# Altium footprint library Footprint-Lib-PhilsLab.PcbLib: 544 footprints (part 12 of 34)
Each footprint in its own frame and in the unit in brackets; x right, y up, seen from the top. Pads: shape width x height; smd on the part's side, far side on the other; paste and mask are expansions set on the pad; w line width, h text height; cw(c..) or ccw(c..) is an arc to the next point about the centre after c.
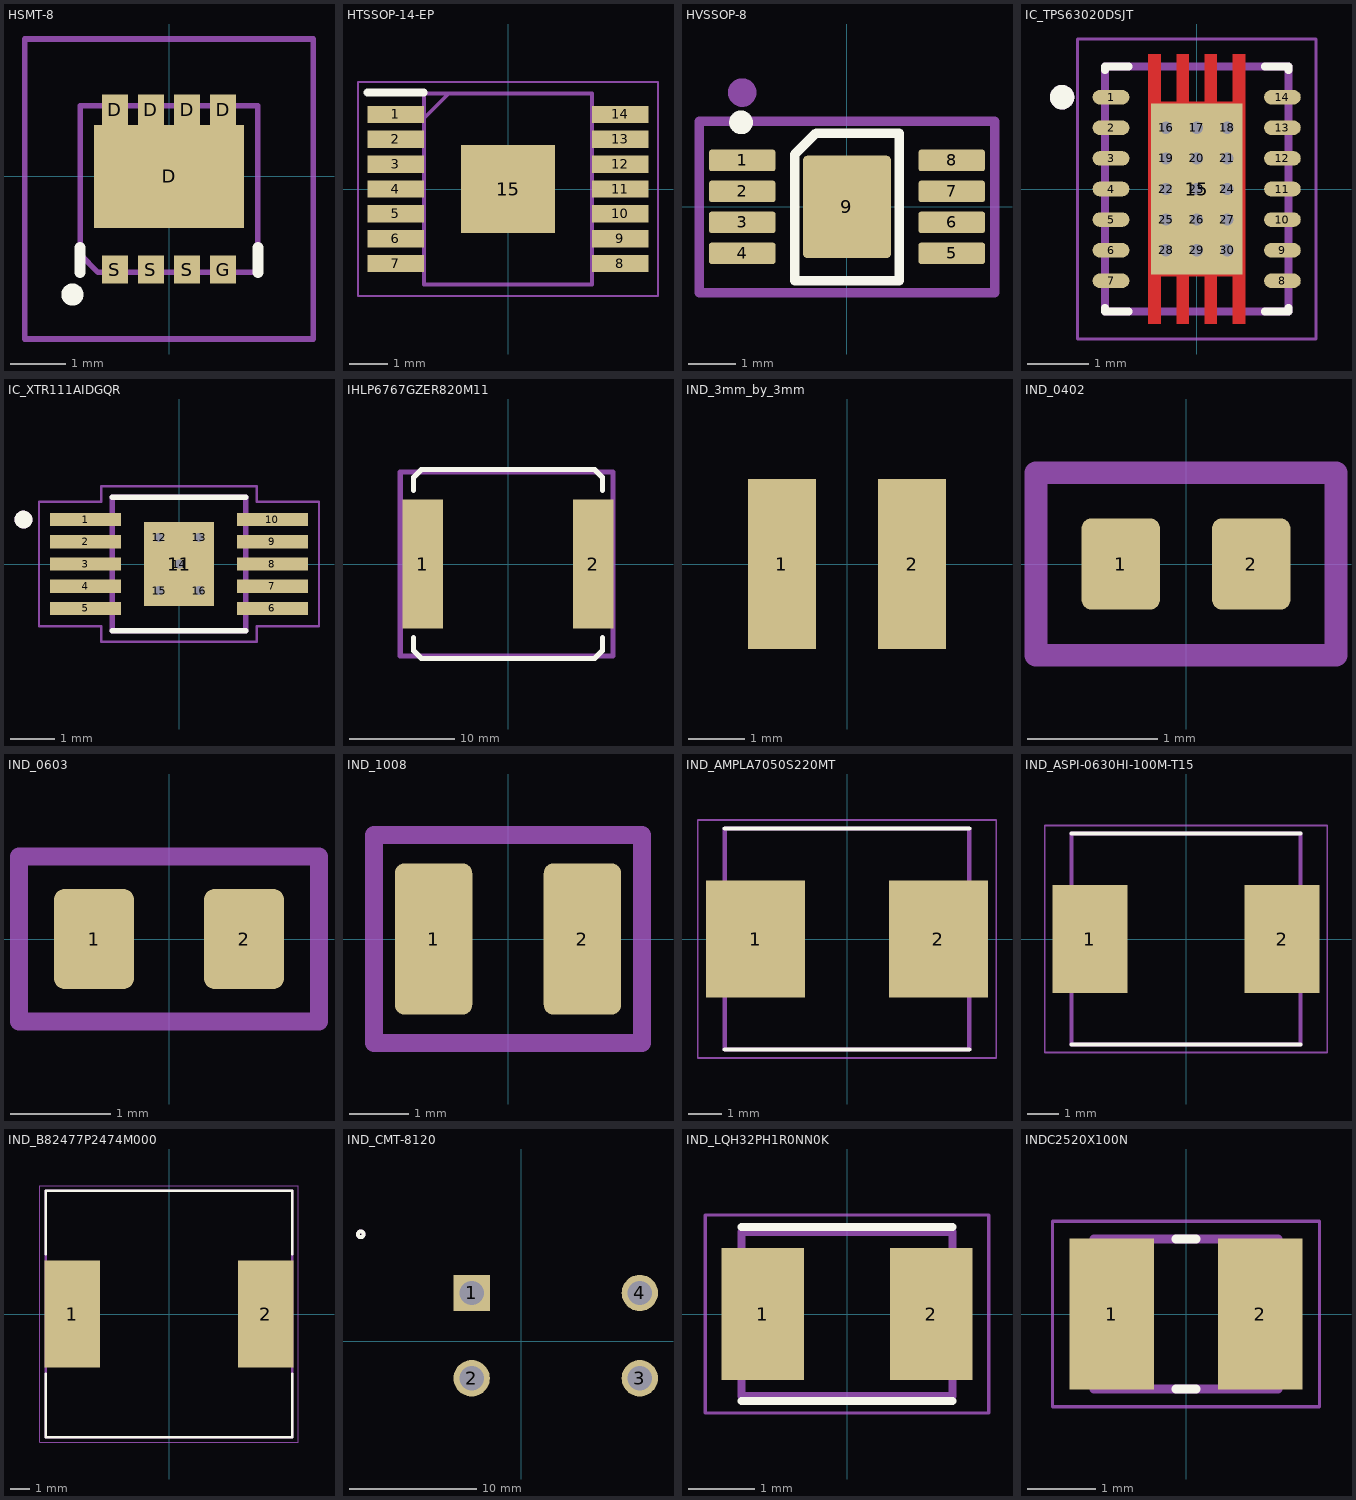
[diagram p11: the footprints below, top view; thin cyan lines are the x and y axes]

## HSMT-8 [mm]
pads (9):
  rect 0.47x0.55 smd: D(-0.975,1.2) D(-0.325,1.2) D(0.325,1.2) D(0.975,1.2)
  rect 2.7x1.85 smd: D(0,0)
  rect 0.47x0.5 smd: G(0.975,-1.675) S(-0.975,-1.675) S(-0.325,-1.675) S(0.325,-1.675)
Top Overlay:
  lines w0.2: -1.6,-1.725 -1.6,-1.275 ; 1.6,-1.725 1.6,-1.275 ; -1.839,-2.125 ccw(c-1.739,-2.125) -1.639,-2.125 ccw(c-1.739,-2.125) -1.839,-2.125
Mechanical 13:
  lines w0.1: -1.6,-1.4 -1.6,1.275 1.6,1.275 1.6,-1.725 -1.275,-1.725 -1.6,-1.4
  text "'.Designator'" at -6.315,-1.4 h1
Mechanical 15:
  lines w0.1: -2.6,-2.925 2.6,-2.925 2.6,2.475 -2.6,2.475 -2.6,-2.925
3D body "RQ3E150GNTB.stp": height 1, standoff 0, extent -1.6,-1.878 1.6,1.428

## HTSSOP-14-EP [mm]
pads (15):
  rect 1.475x0.45 smd: 1(-2.938,1.95) 2(-2.938,1.3) 3(-2.938,0.65) 4(-2.938,0) 5(-2.938,-0.65) 6(-2.938,-1.3) 7(-2.938,-1.95) 8(2.938,-1.95) 9(2.938,-1.3) 10(2.938,-0.65) 11(2.938,0) 12(2.938,0.65) 13(2.938,1.3) 14(2.938,1.95)
  rect 2.46x2.31 smd: 15(0,0)
Top Overlay:
  lines w0.2: -3.675,2.525 -2.2,2.525
Mechanical 13:
  lines w0.1: -2.2,1.85 -1.55,2.5 ; -2.2,-2.5 -2.2,2.5 2.2,2.5 2.2,-2.5 -2.2,-2.5
  text "'.Designator'" at -5.84,-0.925 h1
Mechanical 15:
  lines w0.05: -3.925,-2.8 -3.925,2.8 3.925,2.8 3.925,-2.8 -3.925,-2.8
3D body "TPS54386TPWPRQ1.stp": height 1.13, standoff 0, extent -3.2,-2.5 3.2,2.5

## HVSSOP-8 [mm]
height 1.1
pads (9):
  rrect25% 1.4x0.45 smd: 1(-2.2,0.975) 2(-2.2,0.325) 3(-2.2,-0.325) 4(-2.2,-0.975) 5(2.2,-0.975) 6(2.2,-0.325) 7(2.2,0.325) 8(2.2,0.975)
  rrect10% 1.85x2.15 smd: 9(0,0)
Top Overlay:
  circle w0.25: c-2.225,1.775 r0.125
  lines w0.2: -1.1,-1.55 -1.1,1.1 -0.65,1.55 1.1,1.55 1.1,-1.55 -1.1,-1.55
Mechanical 13:
  circle w0.3: c-2.2,2.4 r0.15
  lines w0.2: -3.1,-1.8 3.1,-1.8 3.1,1.8 -3.1,1.8 -3.1,-1.8
  text "'.Designator'" at -5.815,-0.9 h1
Mechanical 15:
  lines w0.05: -3.15,-1.8 3.15,-1.8 3.15,1.8 -3.15,1.8 -3.15,-1.8
  lines w0.1: -0.5,0 0.5,0 ; 0,-0.5 0,0.5
3D body "HVSSOP-8.step": height 1.1, standoff 0, extent -2.45,-1.55 2.45,1.55

## IC_TPS63020DSJT [mm]
height 1
pads (30):
  oval 0.6x0.24 smd mask+0: 1(-1.4,1.5) 2(-1.4,1) 3(-1.4,0.5) 4(-1.4,0) 5(-1.4,-0.5) 6(-1.4,-1) 7(-1.4,-1.5) 8(1.4,-1.5) 9(1.4,-1) 10(1.4,-0.5) 11(1.4,0) 12(1.4,0.5) 13(1.4,1) 14(1.4,1.5)
  rect 1.5x2.8 smd paste-2 mask+0: 15(0,0)
  round 0.3 hole 0.2: 16(-0.5,1) 17(0,1) 18(0.5,1) 19(-0.5,0.5) 20(0,0.5) 21(0.5,0.5) 22(-0.5,0) 23(0,0) 24(0.5,0) 25(-0.5,-0.5) 26(0,-0.5) 27(0.5,-0.5) 28(-0.5,-1) 29(0,-1) 30(0.5,-1)
Top Layer:
  region: 0.79,-2.2 0.59,-2.2 0.59,-1.425 0.33,-1.425 0.33,-2.2 0.13,-2.2 0.13,-1.425 -0.13,-1.425 -0.13,-2.2 -0.33,-2.2 -0.33,-1.425 -0.59,-1.425 -0.59,-2.2 -0.79,-2.2 -0.79,2.2 -0.59,2.2 -0.59,1.425 -0.33,1.425 -0.33,2.2 -0.13,2.2 -0.13,1.425 0.13,1.425 0.13,2.2 0.33,2.2 0.33,1.425 0.59,1.425 0.59,2.2 0.79,2.2
Top Overlay:
  circle w0.2: c-2.2,1.5 r0.1
  lines w0.127: -1.5,-1.94 -1.5,-2 -1.11,-2 ; -1.5,1.94 -1.5,2 -1.11,2 ; 1.11,-2 1.5,-2 1.5,-1.94 ; 1.11,2 1.5,2 1.5,1.94
Top Paste:
  region: -0.13,-2.2 -0.33,-2.2 -0.33,-1.35 -0.59,-1.35 -0.59,-2.2 -0.79,-2.2 -0.79,-0.1 -0.13,-0.1
  region: 0.79,-2.2 0.59,-2.2 0.59,-1.35 0.33,-1.35 0.33,-2.2 0.13,-2.2 0.13,-0.1 0.79,-0.1
  region: 0.79,0.1 0.13,0.1 0.13,2.2 0.33,2.2 0.33,1.35 0.59,1.35 0.59,2.2 0.79,2.2
  region: -0.13,0.1 -0.79,0.1 -0.79,2.2 -0.59,2.2 -0.59,1.35 -0.33,1.35 -0.33,2.2 -0.13,2.2
Top Solder:
  drawing of 15 lines, arcs and shapes, not listed
Mechanical 13:
  circle w0.2: c-2.2,1.5 r0.1
  lines w0.127: -1.5,-2 -1.5,2 1.5,2 1.5,-2 -1.5,-2
Mechanical 15:
  lines w0.05: -1.95,-2.45 -1.95,2.45 1.95,2.45 1.95,-2.45 -1.95,-2.45
3D body "step_temp.STEP": height 1, standoff 0, extent -1.5,-2 1.5,2

## IC_XTR111AIDGQR [mm]
pads (16):
  rect 1.6x0.3 smd paste-0.025 mask+0.05: 1(-2.1,1) 2(-2.1,0.5) 3(-2.1,0) 4(-2.1,-0.5) 5(-2.1,-1) 6(2.1,-1) 7(2.1,-0.5) 8(2.1,0) 9(2.1,0.5) 10(2.1,1)
  rect 1.57x1.88 smd: 11(0,0)
  round 0.4 hole 0.2 mask+0: 12(-0.45,0.6) 13(0.45,0.6) 14(0,0) 15(-0.45,-0.6) 16(0.45,-0.6)
Top Overlay:
  circle w0.2: c-3.5,1 r0.1
  lines w0.127: -1.5,-1.5 1.5,-1.5 ; -1.5,1.5 1.5,1.5
Mechanical 13:
  circle w0.2: c-3.5,1 r0.1
  lines w0.127: -1.5,-1.5 1.5,-1.5 1.5,1.5 -1.5,1.5 -1.5,-1.5
Mechanical 15:
  lines w0.05: -3.15,-1.4 -1.75,-1.4 -1.75,-1.75 1.75,-1.75 1.75,-1.4 3.15,-1.4 3.15,1.4 1.75,1.4 1.75,1.75 -1.75,1.75 -1.75,1.4 -3.15,1.4 -3.15,-1.4
3D body "step_temp.STEP": height 1.1, standoff 0, extent -2.45,-1.5 2.45,1.5

## IHLP6767GZER820M11 [mm]
pads (2):
  rect 3.825x12.32 smd: 1(-8.12,0) 2(8.12,0)
Top Overlay:
  lines w0.5: -9,-7 -9,-8.25 -8.25,-9 8.25,-9 9,-8.25 9,-7 ; -9,7 -9,8.25 -8.25,9 8.25,9 9,8.25 9,7
Mechanical 13:
  lines w0.5: -10.25,-8.75 -10.25,8.75 10,8.75 10,-8.75 -10.25,-8.75
  text "'.Designator'" at -5.665,-0.417 h1
3D body "IHLP-6767GZ-11.STEP": height 7.01, standoff 0.01, extent -8.575,-8.575 8.575,8.575

## IND_3mm_by_3mm [mm] "Inductor package type: 3mm by 3mm"
pads (2):
  rect 1.2x3 smd: 1(-1.15,0) 2(1.15,0)
3D body "vls3012cx-1.step": height 1.21, standoff 0.01, extent -1.502,-1.509 1.502,1.509

## IND_0402 [mm]
pads (2):
  rrect25% 0.6x0.7 smd: 1(-0.5,0) 2(0.5,0)
Mechanical 13:
  lines w0.175: -1.15,-0.7 1.15,-0.7 1.15,0.7 -1.15,0.7 -1.15,-0.7
  text "'.Designator'" at -5.665,-0.417 h1
3D body "L0402.step": height 0.67, standoff 0.01, extent -0.56,-0.256 0.56,0.256

## IND_0603 [mm]
pads (2):
  rrect25% 0.8x1 smd: 1(-0.75,0) 2(0.75,0)
Mechanical 13:
  lines w0.175: -1.5,-0.825 -1.5,0.825 1.5,0.825 1.5,-0.825 -1.5,-0.825
  text "'.Designator'" at -5.665,-0.417 h1
3D body "L0603.step": height 0.87, standoff 0.01, extent -0.81,-0.365 0.81,0.365

## IND_1008 [mm]
pads (2):
  rrect25% 1.3x2.54 smd: 1(-1.25,0) 2(1.25,0)
Mechanical 13:
  lines w0.3: -2.25,-1.75 -2.25,-0.25 -2.25,1.75 2.25,1.75 2.25,-1.75 -2.25,-1.75
  text "'.Designator'" at -5.84,-0.925 h1
3D body "L1008.stp": height 1.71, standoff -0.09, extent -1.3,-1.05 1.3,1.05

## IND_AMPLA7050S220MT [mm]
height 5
pads (2):
  rect 2.95x3.5 smd paste+0 mask+0.102: 1(-2.725,0) 2(2.725,0)
Top Overlay:
  lines w0.127: -3.65,-3.3 3.65,-3.3 ; -3.65,3.3 3.65,3.3
Mechanical 13:
  lines w0.127: -3.65,-3.3 3.65,-3.3 3.65,3.3 -3.65,3.3 -3.65,-3.3
Mechanical 15:
  lines w0.05: -4.45,-3.55 4.45,-3.55 4.45,3.55 -4.45,3.55 -4.45,-3.55
3D body "step_temp.STEP": height 4.8, standoff -0.07, extent -3.72,-3.3 3.72,3.3

## IND_ASPI-0630HI-100M-T15 [mm]
height 3
pads (2):
  rect 2.35x3.4 smd: 1(-3.025,0) 2(3.025,0)
Top Overlay:
  lines w0.127: -3.6,-3.325 3.6,-3.325 ; -3.6,3.325 3.6,3.325
Mechanical 13:
  lines w0.127: -3.6,-3.325 3.6,-3.325 3.6,3.325 -3.6,3.325 -3.6,-3.325
Mechanical 15:
  lines w0.05: -4.45,-3.575 4.45,-3.575 4.45,3.575 -4.45,3.575 -4.45,-3.575
3D body "step_temp.STEP": height 2.95, standoff -0.05, extent -3.6,-3.325 3.6,3.325

## IND_B82477P2474M000 [mm]
height 6.5
pads (2):
  rect 2.8x5.4 smd: 1(-4.9,0) 2(4.9,0)
Top Overlay:
  lines w0.127: -6.25,-3.02 -6.25,-6.25 6.25,-6.25 6.25,-3.02 ; -6.25,3.02 -6.25,6.25 6.25,6.25 6.25,3.02
Mechanical 13:
  lines w0.127: -6.25,-6.25 6.25,-6.25 6.25,6.25 -6.25,6.25 -6.25,-6.25
Mechanical 15:
  lines w0.05: -6.55,-6.5 6.55,-6.5 6.55,6.5 -6.55,6.5 -6.55,-6.5
3D body "step_temp.STEP": height 6.5, standoff 0, extent -6.25,-6.25 6.25,6.25

## IND_CMT-8120 [mm]
pads (4):
  rect 2.857x2.857 hole 1.905: 1(-3.9,3.8)
  round 2.857 hole 1.905: 2(-3.9,-2.9) 3(9.3,-2.9) 4(9.3,3.8)
Top Overlay:
  circle w0.3: c-12.6,8.4 r0.224
Mechanical 13:
  circle w0.3: c-12.6,8.4 r0.224
3D body "!ommonModeChoke2.stp": height 21.37, standoff -3.02, extent -7.948,-4.8 13.348,5.837

## IND_LQH32PH1R0NN0K [mm]
pads (2):
  rect 1.25x2 smd: 1(-1.275,0) 2(1.275,0)
Top Overlay:
  lines w0.127: -1.6,-1.32 1.6,-1.32 ; -1.6,1.32 1.6,1.32
Mechanical 13:
  lines w0.127: -1.6,-1.25 -1.6,1.25 1.6,1.25 1.6,-1.25 -1.6,-1.25
Mechanical 15:
  lines w0.05: -2.15,-1.5 -2.15,1.5 2.15,1.5 2.15,-1.5 -2.15,-1.5

## INDC2520X100N [mm]
pads (2):
  rect 1.24x2.22 smd: 1(-1.09,0) 2(1.09,0)
Top Overlay:
  lines w0.127: -0.15,-1.1 0.15,-1.1 ; -0.15,1.1 0.15,1.1
Mechanical 13:
  lines w0.127: -1.35,-1.1 -1.35,1.1 1.35,1.1 1.35,-1.1 -1.35,-1.1
Mechanical 15:
  lines w0.05: -1.958,-1.358 -1.958,1.358 1.958,1.358 1.958,-1.358 -1.958,-1.358
3D body "1269AS-H-1R5M=P2.STEP": height 1, standoff 0, extent -1.26,-0.94 1.24,1.06